# Altium schematic symbol library 3Cnts-S.SchLib: 1 symbol
Pins are listed as number, name and electrical type; pins without a type are passive.

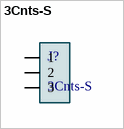
[diagram p0: symbol 3Cnts-S]

## 3Cnts-S
designator J?
MP: MTSW-104-06-T-S-115; Price: None; Value: *; Availability: Unavailable; Package: None
footprint 3Cnts-S
pins: 1, 2, 3